# Altium schematic symbol library BAT5404E6327HTSA1.SchLib: 1 symbol
Pins are listed as number, name and electrical type; pins without a type are passive.

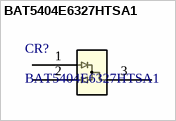
[diagram p0: symbol BAT5404E6327HTSA1]

## BAT5404E6327HTSA1
designator CR?
Silicon Schottky Diode; Manufacturer_Name: Infineon; Type: Diodes - Rectifiers, Arrays; Copyright: Copyright (C) 2025 Ultra Librarian. All rights reserved.; Manufacturer_Part_Number: BAT5404E6327HTSA1; RefDes: RefDes
footprint SOT23_INF
pins: 1, 2, 3